# Altium footprint library Brian_.PcbLib: 66 footprints (part 4 of 5)
Each footprint in its own frame and in the unit in brackets; x right, y up, seen from the top. Pads: shape width x height; smd on the part's side, far side on the other; paste and mask are expansions set on the pad; w line width, h text height; cw(c..) or ccw(c..) is an arc to the next point about the centre after c.
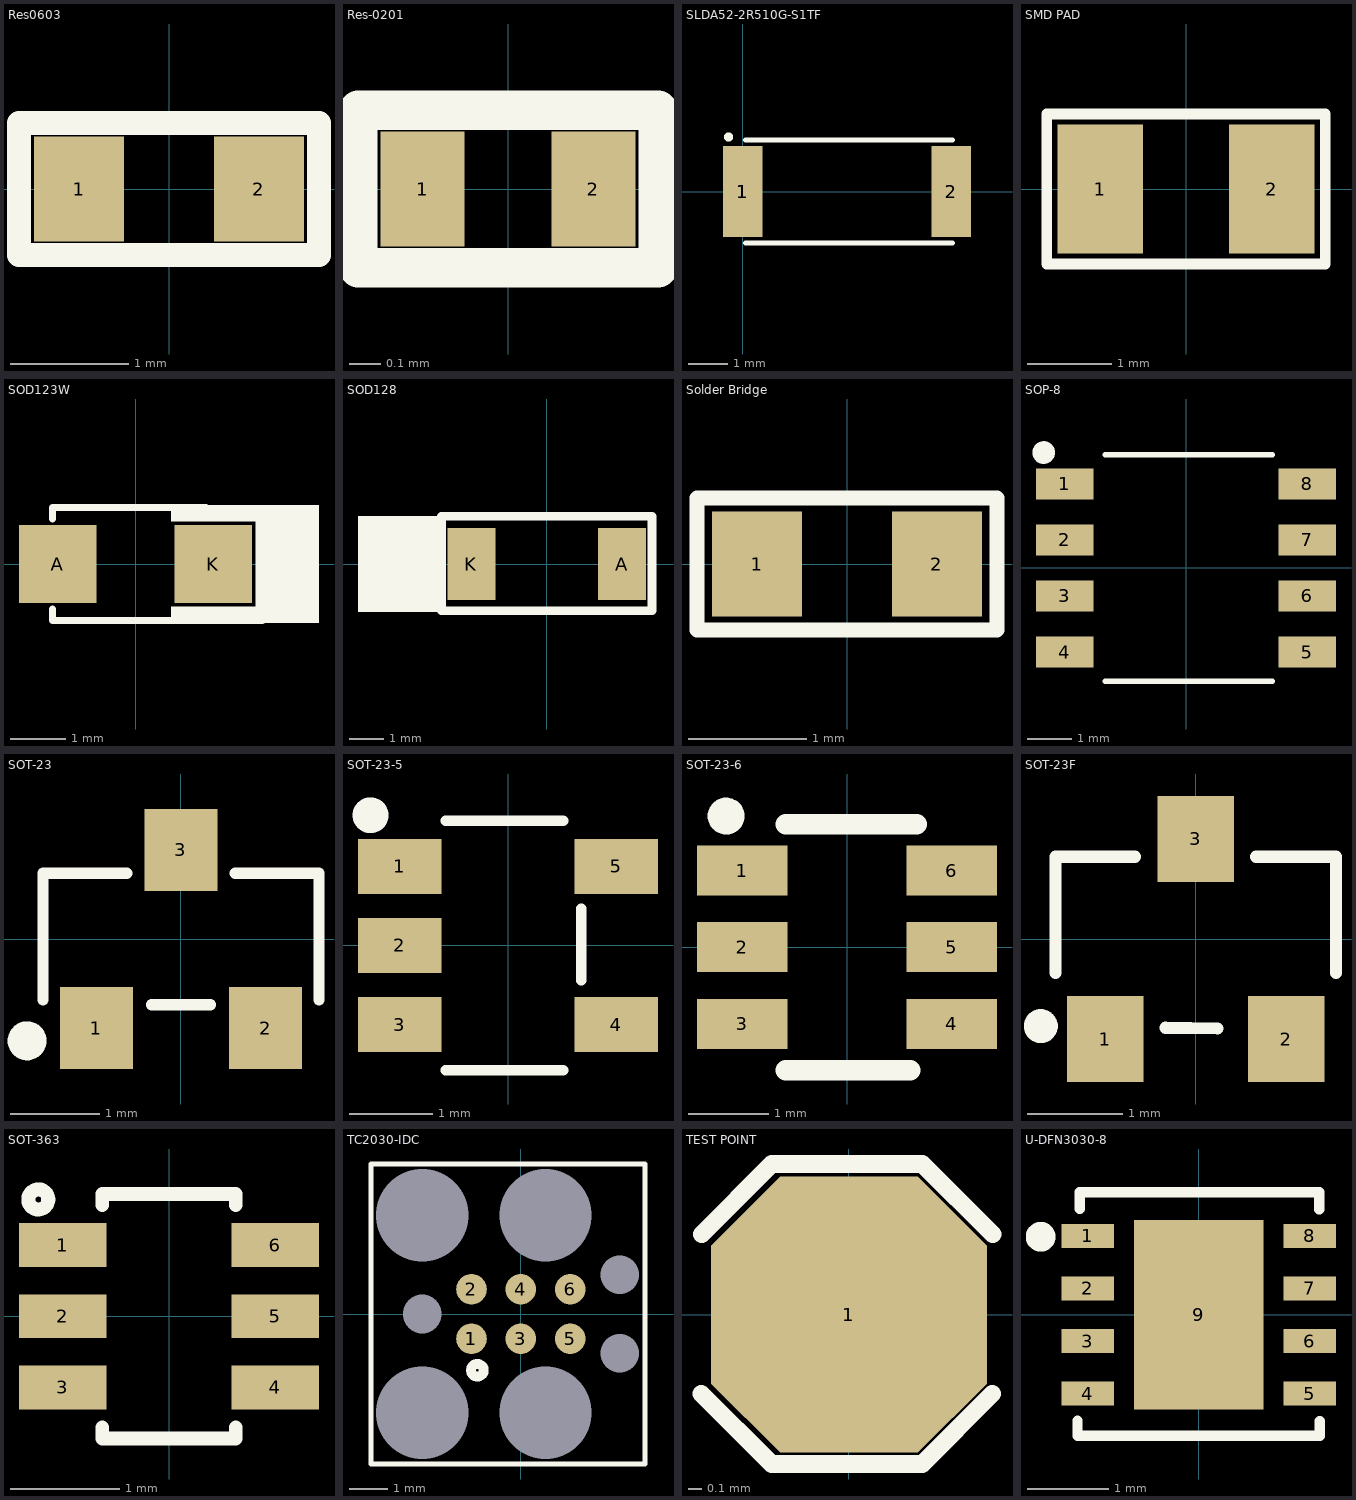
[diagram p3: the footprints below, top view; thin cyan lines are the x and y axes]

## Res0603 [mil]
pads (2):
  rect 30x35 smd: 1(-30,0) 2(30,0)
Top Overlay:
  lines w7.87: -50,-22 50,-22 50,22 -50,22 -50,-22
3D body "User Library-RESC1608X05N.step": height 17.76, standoff 0, extent -30.52,-16.74 30.51,16.73

## Res-0201 [mm]
pads (2):
  rect 0.27x0.37 smd: 1(-0.275,0) 2(0.275,0)
Top Overlay:
  lines w0.127: -0.483,-0.254 0.483,-0.254 0.483,0.254 -0.483,0.254 -0.483,-0.254
3D body "User Library-0201(0603M) Res.step": height 0.29, standoff -0.02, extent -0.305,-0.152 0.305,0.153

## SLDA52-2R510G-S1TF [mm]
pads (3):
  rect 1x2.3 smd: 1(0,0) 1(0,0) 2(5.25,0)
Top Overlay:
  circle w0.127: c-0.356,1.372 r0.051
  lines w0.127: 0.076,-1.295 5.276,-1.295 ; 0.076,1.295 5.276,1.295

## SMD PAD [mil] "SMD 0805"
pads (2):
  rect 40x60 smd: 1(-40,0) 2(40,0)
Top Overlay:
  lines w5: -65,-35 -65,35 65,35 65,-35 -65,-35

## SOD123W [mm] "DIODE SCHOTTKY 30V 1A SOD123W"
pads (2):
  rect 1.4x1.4 smd: A(-1.4,0) K(1.4,0)
Top Overlay:
  region: 2.286,1.067 0.635,1.067 0.635,0.762 2.286,0.762
  region: 2.286,-0.762 0.635,-0.762 0.635,-1.067 2.286,-1.067
  region: 3.302,1.067 2.159,1.067 2.159,-1.067 3.302,-1.067
  lines w0.127: -1.499,-0.813 -1.499,-1.016 2.286,-1.016 ; -1.499,0.813 -1.499,1.016 -1.143,1.016 1.27,1.016
3D body "User Library-SOD123W.step": height 1.1, standoff -0.01, extent -2,-0.95 2,0.95

## SOD128 [mm] "30V 5A 360mV @ 5A SOD128 Schottky Barrier Diodes (SBD) RoHS"
pads (2):
  rect 1.4x2.1 smd: A(2.2,0) K(-2.2,0)
Top Overlay:
  rectangle: -5.512,-1.397 -2.946,1.397
  lines w0.254: -3.073,-1.361 -3.073,1.397 3.073,1.397 3.073,-1.361 -3.073,-1.361
3D body "User Library-SOD128.step": height 1.1, standoff -0.01, extent -2.5,-1.35 2.5,1.35

## Solder Bridge [mil] "Solder Bridge ON"
pads (2):
  rect 30x35 smd: 1(-30,0) 2(30,0)
Top Overlay:
  lines w5: -50,-22 -50,22 50,22 50,-22 -50,-22

## SOP-8 [mm]
pads (8):
  rect 1.3x0.7 smd: 1(-2.75,1.905) 2(-2.75,0.635) 3(-2.75,-0.635) 4(-2.75,-1.905) 5(2.75,-1.905) 6(2.75,-0.635) 7(2.75,0.635) 8(2.75,1.905)
Top Overlay:
  circle w0.254: c-3.226,2.616 r0.13
  lines w0.127: -1.829,-2.565 1.956,-2.565 ; -1.829,2.565 1.956,2.565
3D body "SOP-8.STEP": height 1.87, standoff 0, extent -3.11,-2.5 3.11,2.5

## SOT-23 [mm] "TRANS NPN 40V 0.6A SOT23"
pads (3):
  rect 0.82x0.92 smd: 1(-0.95,-1) 2(0.95,-1) 3(0,1)
Top Overlay:
  circle w0.254: c-1.727,-1.143 r0.092
  lines w0.127: -1.549,-0.686 -1.549,0.737 -0.61,0.737 ; -0.33,-0.737 0.33,-0.737 ; 0.61,0.737 1.549,0.737 1.549,-0.686
3D body "CircuitWorks-SOT-23.step": height 1.1, standoff 0, extent -1.5,-1.25 1.5,1.25

## SOT-23-5 [mm]
pads (5):
  rect 1x0.66 smd: 1(-1.3,0.95) 2(-1.3,0) 3(-1.3,-0.95) 4(1.3,-0.95) 5(1.3,0.95)
Top Overlay:
  circle w0.254: c-1.65,1.562 r0.088
  lines w0.127: -0.748,-1.496 0.66,-1.496 ; -0.748,1.496 0.66,1.496 ; 0.88,-0.418 0.88,0.44
3D body "SN74LV1T34DBVR.STEP": height 1.45, standoff 0, extent -1.4,-1.45 1.4,1.45

## SOT-23-6 [mm] "IC BAT CHG LI-ION 1 CELL SOT23-6"
pads (6):
  rect 1.12x0.62 smd: 1(-1.3,0.95) 2(-1.3,0) 3(-1.3,-0.95) 4(1.3,-0.95) 5(1.3,0) 6(1.3,0.95)
Top Overlay:
  circle w0.254: c-1.499,1.626 r0.102
  lines w0.254: -0.762,-1.524 0.787,-1.524 ; -0.762,1.524 0.864,1.524
3D body "User Library-SOT23-6-2.step": height 1.44, standoff -0.01, extent -1.4,-1.45 1.4,1.45

## SOT-23F [mm]
pads (3):
  rect 0.8x0.9 smd: 1(-0.95,-1.05) 2(0.95,-1.05) 3(0,1.05)
Top Overlay:
  circle w0.254: c-1.626,-0.914 r0.051
  lines w0.127: -1.473,-0.356 -1.473,0.864 -0.635,0.864 ; -0.315,-0.932 0.229,-0.94 ; 0.635,0.864 1.473,0.864 1.473,-0.356
3D body "User Library-SOT23F.STEP": height 0.89, standoff -0.02, extent -1.45,-1.2 1.45,1.2

## SOT-363 [mm] "Dual Digital Transistors"
pads (6):
  rect 0.8x0.4 smd: 1(-0.97,0.65) 2(-0.97,0) 3(-0.97,-0.65) 4(0.97,-0.65) 5(0.97,0) 6(0.97,0.65)
Top Overlay:
  circle w0.127: c-1.194,1.067 r0.092
  lines w0.127: -0.61,-1.016 -0.61,-1.118 0.61,-1.118 0.61,-1.016 ; -0.61,1.016 -0.61,1.118 0.61,1.118 0.61,1.016
3D body "User Library-SOT363-2.STEP": height 1.08, standoff -0.02, extent -1.2,-1.1 1.2,1.1

## TC2030-IDC [mm] "CABLE ADAPTER 6 POS"
pads (14):
  round 0.787 smd: 1(-1.27,-0.635) 1(-1.27,-0.635) 2(-1.27,0.635) 3(0,-0.635) 4(0,0.635) 5(1.27,-0.635) 6(1.27,0.635)
  round 0 hole 2.375 unplated mask+0.102: MP1(-2.54,-2.54) MP2(0.635,-2.54) MP3(0.635,2.54) MP4(-2.54,2.54)
  round 0 hole 0.991 unplated mask+0.102: MP5(-2.54,0) MP6(2.54,-1.016) MP7(2.54,1.016)
Top Overlay:
  circle w0.254: c-1.118,-1.448 r0.163
  lines w0.127: -3.861,-3.861 -3.861,3.861 3.2,3.861 3.2,-3.861 -3.861,-3.861

## TEST POINT [mm]
pads (1):
  oct 2x2 smd: 1(0,0)
Top Overlay:
  lines w0.127: -1.069,-0.574 -0.561,-1.082 0.532,-1.082 1.04,-0.574 ; -1.067,0.584 -0.559,1.092 0.533,1.092 1.041,0.584

## U-DFN3030-8 [mm] "Fixed 6V 3.3V 360mV @ 1A UDFN-8 Dropout Regulators(LDO) RoHS"
pads (9):
  rect 0.65x0.3 smd: 1(-1.375,0.975) 2(-1.375,0.325) 3(-1.375,-0.325) 4(-1.375,-0.975) 5(1.375,-0.975) 6(1.375,-0.325) 7(1.375,0.325) 8(1.375,0.975)
  rect 1.6x2.35 smd: 9(0,0)
Top Overlay:
  circle w0.254: c-1.956,0.965 r0.057
  lines w0.127: -1.498,-1.31 -1.498,-1.499 1.498,-1.499 1.498,-1.318 ; -1.471,1.308 -1.471,1.517 1.491,1.517 1.491,1.303
3D body "DFN3030E-8_STP.stp": height 0.59, standoff -0.01, extent -1.5,-1.5 1.5,1.5